# Altium footprint library WR-TBL_Pluggable Connector_3.81mm.PcbLib: 201 footprints (part 5 of 13)
Each footprint in its own frame and in the unit in brackets; x right, y up, seen from the top. Pads: shape width x height; smd on the part's side, far side on the other; paste and mask are expansions set on the pad; w line width, h text height; cw(c..) or ccw(c..) is an arc to the next point about the centre after c.
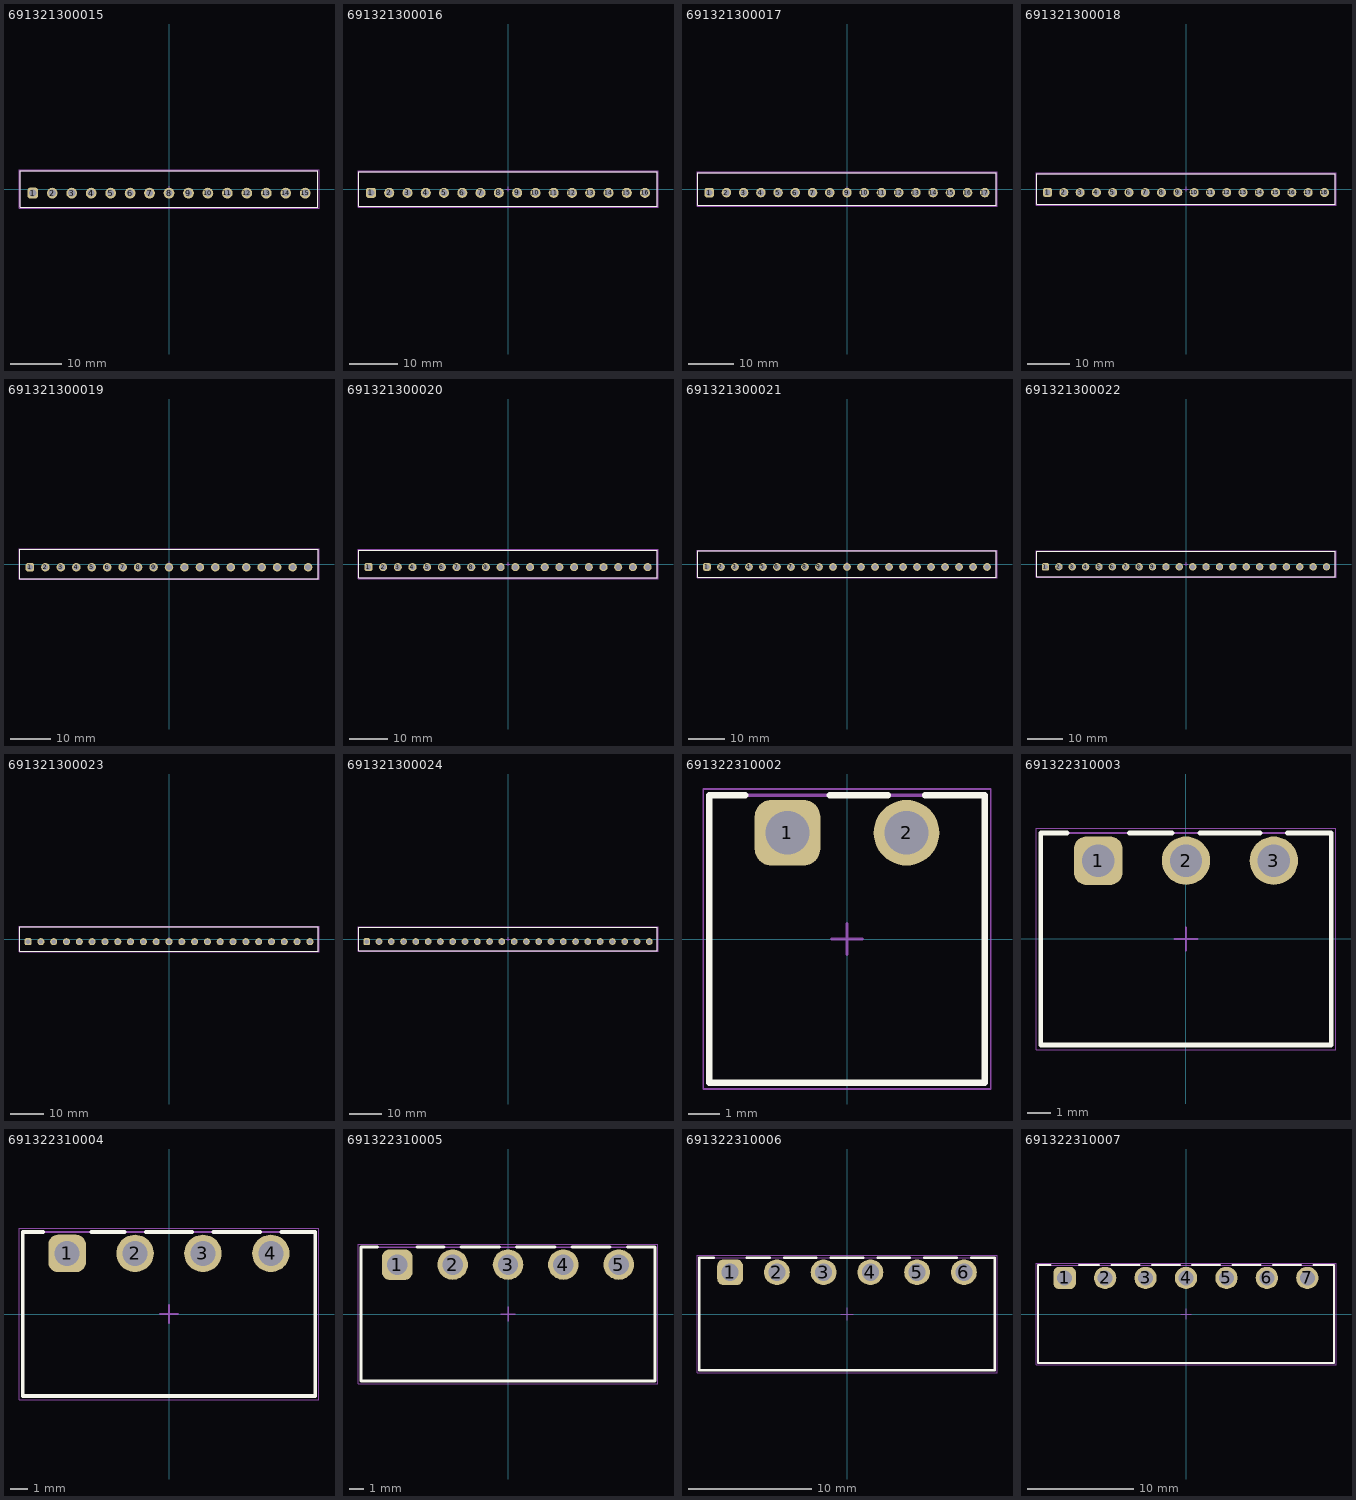
[diagram p4: the footprints below, top view; thin cyan lines are the x and y axes]

## 691321300015 [mm] "Vertical PCB Header, pitch 3.81mm, 15p"
height 9.2
pads (15):
  rrect50% 2.1x2.1 hole 1.4: 1(-26.67,-0.8)
  round 2.1 hole 1.4: 2(-22.86,-0.8) 3(-19.05,-0.8) 4(-15.24,-0.8) 5(-11.43,-0.8) 6(-7.62,-0.8) 7(-3.81,-0.8) 8(0,-0.8) 9(3.81,-0.8) 10(7.62,-0.8) 11(11.43,-0.8) 12(15.24,-0.8) 13(19.05,-0.8) 14(22.86,-0.8) 15(26.67,-0.8)
Top Overlay:
  lines w0.2: -29.17,-3.6 29.17,-3.6 29.17,3.6 -29.17,3.6 -29.17,-3.6
Top Assembly:
  lines w0.1: -29.17,-3.6 -29.17,3.6 29.17,3.6 29.17,-3.6 -29.17,-3.6
Top Designator:
  text ".Designator" at -3.647,-0.357 h1
Top 3D Body:
  lines w0.1: -29.17,-3.6 29.17,-3.6 29.17,3.6 -29.17,3.6 -29.17,-3.6
Top Courtyard:
  lines w0.05: -29.37,-3.8 -29.37,3.8 29.37,3.8 29.37,-3.8 -29.37,-3.8
Top Component Center:
  lines w0.1: -0.5,0 0.5,0 ; 0,-0.5 0,0.5
3D body "691321300015.stp": height 9.25, standoff -3.45, extent -29.17,-3.6 29.17,3.6

## 691321300016 [mm] "Vertical PCB Header, pitch 3.81mm, 16p"
height 9.2
pads (16):
  rrect50% 2.1x2.1 hole 1.4: 1(-28.575,-0.8)
  round 2.1 hole 1.4: 2(-24.765,-0.8) 3(-20.955,-0.8) 4(-17.145,-0.8) 5(-13.335,-0.8) 6(-9.525,-0.8) 7(-5.715,-0.8) 8(-1.905,-0.8) 9(1.905,-0.8) 10(5.715,-0.8) 11(9.525,-0.8) 12(13.335,-0.8) 13(17.145,-0.8) 14(20.955,-0.8) 15(24.765,-0.8) 16(28.575,-0.8)
Top Overlay:
  lines w0.2: -31.075,-3.6 31.075,-3.6 31.075,3.6 -31.075,3.6 -31.075,-3.6
Top Assembly:
  lines w0.1: -31.075,-3.6 -31.075,3.6 31.075,3.6 31.075,-3.6 -31.075,-3.6
Top Designator:
  text ".Designator" at -3.647,-0.357 h1
Top 3D Body:
  lines w0.1: -31.075,-3.6 31.075,-3.6 31.075,3.6 -31.075,3.6 -31.075,-3.6
Top Courtyard:
  lines w0.05: -31.275,-3.8 -31.275,3.8 31.275,3.8 31.275,-3.8 -31.275,-3.8
Top Component Center:
  lines w0.1: -0.5,0 0.5,0 ; 0,-0.5 0,0.5
3D body "691321300016.stp": height 9.25, standoff -3.45, extent -31.075,-3.6 31.075,3.6

## 691321300017 [mm] "Vertical PCB Header, pitch 3.81mm, 17p"
height 9.2
pads (17):
  rrect50% 2.1x2.1 hole 1.4: 1(-30.48,-0.8)
  round 2.1 hole 1.4: 2(-26.67,-0.8) 3(-22.86,-0.8) 4(-19.05,-0.8) 5(-15.24,-0.8) 6(-11.43,-0.8) 7(-7.62,-0.8) 8(-3.81,-0.8) 9(0,-0.8) 10(3.81,-0.8) 11(7.62,-0.8) 12(11.43,-0.8) 13(15.24,-0.8) 14(19.05,-0.8) 15(22.86,-0.8) 16(26.67,-0.8) 17(30.48,-0.8)
Top Overlay:
  lines w0.2: -32.98,-3.6 -32.98,3.6 32.98,3.6 32.98,-3.6 -32.98,-3.6
Top Assembly:
  lines w0.1: -32.98,-3.6 32.98,-3.6 32.98,3.6 -32.98,3.6 -32.98,-3.6
Top Designator:
  text ".Designator" at -3.647,-0.357 h1
Top 3D Body:
  lines w0.1: -32.98,-3.6 -32.98,3.6 32.98,3.6 32.98,-3.6 -32.98,-3.6
Top Courtyard:
  lines w0.05: -33.18,-3.8 33.18,-3.8 33.18,3.8 -33.18,3.8 -33.18,-3.8
Top Component Center:
  lines w0.1: -0.5,0 0.5,0 ; 0,-0.5 0,0.5
3D body "691321300017.stp": height 9.25, standoff -3.45, extent -32.98,-3.6 32.98,3.6

## 691321300018 [mm] "Vertical PCB Header, pitch 3.81mm, 18p"
height 9.2
pads (18):
  rrect50% 2.1x2.1 hole 1.4: 1(-32.385,-0.8)
  round 2.1 hole 1.4: 2(-28.575,-0.8) 3(-24.765,-0.8) 4(-20.955,-0.8) 5(-17.145,-0.8) 6(-13.335,-0.8) 7(-9.525,-0.8) 8(-5.715,-0.8) 9(-1.905,-0.8) 10(1.905,-0.8) 11(5.715,-0.8) 12(9.525,-0.8) 13(13.335,-0.8) 14(17.145,-0.8) 15(20.955,-0.8) 16(24.765,-0.8) 17(28.575,-0.8) 18(32.385,-0.8)
Top Overlay:
  lines w0.2: -34.885,-3.6 34.885,-3.6 34.885,3.6 -34.885,3.6 -34.885,-3.6
Top Assembly:
  lines w0.1: -34.885,-3.6 -34.885,3.6 34.885,3.6 34.885,-3.6 -34.885,-3.6
Top Designator:
  text ".Designator" at -3.647,-0.357 h1
Top 3D Body:
  lines w0.1: -34.885,-3.6 34.885,-3.6 34.885,3.6 -34.885,3.6 -34.885,-3.6
Top Courtyard:
  lines w0.05: -35.085,-3.8 -35.085,3.8 35.085,3.8 35.085,-3.8 -35.085,-3.8
Top Component Center:
  lines w0.1: -0.5,0 0.5,0 ; 0,-0.5 0,0.5
3D body "691321300018.stp": height 9.25, standoff -3.45, extent -34.885,-3.6 34.885,3.6

## 691321300019 [mm] "Vertical PCB Header, pitch 3.81mm, 19p"
height 9.2
pads (19):
  rrect50% 2.1x2.1 hole 1.4: 1(-34.29,-0.8)
  round 2.1 hole 1.4: 2(-30.48,-0.8) 3(-26.67,-0.8) 4(-22.86,-0.8) 5(-19.05,-0.8) 6(-15.24,-0.8) 7(-11.43,-0.8) 8(-7.62,-0.8) 9(-3.81,-0.8) 10(0,-0.8) 11(3.81,-0.8) 12(7.62,-0.8) 13(11.43,-0.8) 14(15.24,-0.8) 15(19.05,-0.8) 16(22.86,-0.8) 17(26.67,-0.8) 18(30.48,-0.8) 19(34.29,-0.8)
Top Overlay:
  lines w0.2: -36.79,-3.6 36.79,-3.6 36.79,3.6 -36.79,3.6 -36.79,-3.6
Top Assembly:
  lines w0.1: -36.79,-3.6 -36.79,3.6 36.79,3.6 36.79,-3.6 -36.79,-3.6
Top Designator:
  text ".Designator" at -3.647,-0.357 h1
Top 3D Body:
  lines w0.1: -36.79,-3.6 36.79,-3.6 36.79,3.6 -36.79,3.6 -36.79,-3.6
Top Courtyard:
  lines w0.05: -36.99,-3.8 -36.99,3.8 36.99,3.8 36.99,-3.8 -36.99,-3.8
Top Component Center:
  lines w0.1: -0.5,0 0.5,0 ; 0,-0.5 0,0.5
3D body "691321300019.stp": height 9.25, standoff -3.45, extent -36.79,-3.6 36.79,3.6

## 691321300020 [mm] "Vertical PCB Header, pitch 3.81mm, 20p"
height 9.2
pads (20):
  rrect50% 2.1x2.1 hole 1.4: 1(-36.195,-0.8)
  round 2.1 hole 1.4: 2(-32.385,-0.8) 3(-28.575,-0.8) 4(-24.765,-0.8) 5(-20.955,-0.8) 6(-17.145,-0.8) 7(-13.335,-0.8) 8(-9.525,-0.8) 9(-5.715,-0.8) 10(-1.905,-0.8) 11(1.905,-0.8) 12(5.715,-0.8) 13(9.525,-0.8) 14(13.335,-0.8) 15(17.145,-0.8) 16(20.955,-0.8) 17(24.765,-0.8) 18(28.575,-0.8) 19(32.385,-0.8) 20(36.195,-0.8)
Top Overlay:
  lines w0.2: -38.695,-3.6 38.695,-3.6 38.695,3.6 -38.695,3.6 -38.695,-3.6
Top Assembly:
  lines w0.1: -38.695,-3.6 -38.695,3.6 38.695,3.6 38.695,-3.6 -38.695,-3.6
Top Designator:
  text ".Designator" at -3.647,-0.357 h1
Top 3D Body:
  lines w0.1: -38.695,-3.6 38.695,-3.6 38.695,3.6 -38.695,3.6 -38.695,-3.6
Top Courtyard:
  lines w0.05: -38.895,-3.8 -38.895,3.8 38.895,3.8 38.895,-3.8 -38.895,-3.8
Top Component Center:
  lines w0.1: -0.5,0 0.5,0 ; 0,-0.5 0,0.5
3D body "691321300020.stp": height 9.25, standoff -3.45, extent -38.695,-3.6 38.695,3.6

## 691321300021 [mm] "Vertical PCB Header, pitch 3.81mm, 21p"
height 9.2
pads (21):
  rrect50% 2.1x2.1 hole 1.4: 1(-38.1,-0.8)
  round 2.1 hole 1.4: 2(-34.29,-0.8) 3(-30.48,-0.8) 4(-26.67,-0.8) 5(-22.86,-0.8) 6(-19.05,-0.8) 7(-15.24,-0.8) 8(-11.43,-0.8) 9(-7.62,-0.8) 10(-3.81,-0.8) 11(0,-0.8) 12(3.81,-0.8) 13(7.62,-0.8) 14(11.43,-0.8) 15(15.24,-0.8) 16(19.05,-0.8) 17(22.86,-0.8) 18(26.67,-0.8) 19(30.48,-0.8) 20(34.29,-0.8) 21(38.1,-0.8)
Top Overlay:
  lines w0.2: -40.6,-3.6 40.6,-3.6 40.6,3.6 -40.6,3.6 -40.6,-3.6
Top Assembly:
  lines w0.1: -40.6,-3.6 -40.6,3.6 40.6,3.6 40.6,-3.6 -40.6,-3.6
Top Designator:
  text ".Designator" at -3.647,-0.357 h1
Top 3D Body:
  lines w0.1: -40.6,-3.6 40.6,-3.6 40.6,3.6 -40.6,3.6 -40.6,-3.6
Top Courtyard:
  lines w0.05: -40.8,-3.8 -40.8,3.8 40.8,3.8 40.8,-3.8 -40.8,-3.8
Top Component Center:
  lines w0.1: -0.5,0 0.5,0 ; 0,-0.5 0,0.5
3D body "691321300021.stp": height 9.25, standoff -3.45, extent -40.6,-3.6 40.6,3.6

## 691321300022 [mm] "Vertical PCB Header, pitch 3.81mm, 22p"
height 9.2
pads (22):
  rrect50% 2.1x2.1 hole 1.4: 1(-40.005,-0.8)
  round 2.1 hole 1.4: 2(-36.195,-0.8) 3(-32.385,-0.8) 4(-28.575,-0.8) 5(-24.765,-0.8) 6(-20.955,-0.8) 7(-17.145,-0.8) 8(-13.335,-0.8) 9(-9.525,-0.8) 10(-5.715,-0.8) 11(-1.905,-0.8) 12(1.905,-0.8) 13(5.715,-0.8) 14(9.525,-0.8) 15(13.335,-0.8) 16(17.145,-0.8) 17(20.955,-0.8) 18(24.765,-0.8) 19(28.575,-0.8) 20(32.385,-0.8) 21(36.195,-0.8) 22(40.005,-0.8)
Top Overlay:
  lines w0.2: -42.505,-3.6 -42.505,3.6 42.505,3.6 42.505,-3.6 -42.505,-3.6
Top Assembly:
  lines w0.1: -42.505,-3.6 42.505,-3.6 42.505,3.6 -42.505,3.6 -42.505,-3.6
Top Designator:
  text ".Designator" at -3.647,-0.357 h1
Top 3D Body:
  lines w0.1: -42.505,-3.6 -42.505,3.6 42.505,3.6 42.505,-3.6 -42.505,-3.6
Top Courtyard:
  lines w0.05: -42.705,-3.8 42.705,-3.8 42.705,3.8 -42.705,3.8 -42.705,-3.8
Top Component Center:
  lines w0.1: -0.5,0 0.5,0 ; 0,-0.5 0,0.5
3D body "691321300022.stp": height 9.25, standoff -3.45, extent -42.505,-3.6 42.505,3.6

## 691321300023 [mm] "Vertical PCB Header, pitch 3.81mm, 23p"
height 9.2
pads (23):
  rrect50% 2.1x2.1 hole 1.4: 1(-41.91,-0.8)
  round 2.1 hole 1.4: 2(-38.1,-0.8) 3(-34.29,-0.8) 4(-30.48,-0.8) 5(-26.67,-0.8) 6(-22.86,-0.8) 7(-19.05,-0.8) 8(-15.24,-0.8) 9(-11.43,-0.8) 10(-7.62,-0.8) 11(-3.81,-0.8) 12(0,-0.8) 13(3.81,-0.8) 14(7.62,-0.8) 15(11.43,-0.8) 16(15.24,-0.8) 17(19.05,-0.8) 18(22.86,-0.8) 19(26.67,-0.8) 20(30.48,-0.8) 21(34.29,-0.8) 22(38.1,-0.8) 23(41.91,-0.8)
Top Overlay:
  lines w0.2: -44.41,-3.6 -44.41,3.6 44.41,3.6 44.41,-3.6 -44.41,-3.6
Top Assembly:
  lines w0.1: -44.41,-3.6 44.41,-3.6 44.41,3.6 -44.41,3.6 -44.41,-3.6
Top Designator:
  text ".Designator" at -3.647,-0.357 h1
Top 3D Body:
  lines w0.1: -44.41,-3.6 -44.41,3.6 44.41,3.6 44.41,-3.6 -44.41,-3.6
Top Courtyard:
  lines w0.05: -44.61,-3.8 44.61,-3.8 44.61,3.8 -44.61,3.8 -44.61,-3.8
Top Component Center:
  lines w0.1: -0.5,0 0.5,0 ; 0,-0.5 0,0.5
3D body "691321300023.stp": height 9.25, standoff -3.45, extent -44.41,-3.6 44.41,3.6

## 691321300024 [mm] "Vertical PCB Header, pitch 3.81mm, 24p"
height 9.2
pads (24):
  rrect50% 2.1x2.1 hole 1.4: 1(-43.815,-0.8)
  round 2.1 hole 1.4: 2(-40.005,-0.8) 3(-36.195,-0.8) 4(-32.385,-0.8) 5(-28.575,-0.8) 6(-24.765,-0.8) 7(-20.955,-0.8) 8(-17.145,-0.8) 9(-13.335,-0.8) 10(-9.525,-0.8) 11(-5.715,-0.8) 12(-1.905,-0.8) 13(1.905,-0.8) 14(5.715,-0.8) 15(9.525,-0.8) 16(13.335,-0.8) 17(17.145,-0.8) 18(20.955,-0.8) 19(24.765,-0.8) 20(28.575,-0.8) 21(32.385,-0.8) 22(36.195,-0.8) 23(40.005,-0.8) 24(43.815,-0.8)
Top Overlay:
  lines w0.2: -46.315,-3.6 -46.315,3.6 46.315,3.6 46.315,-3.6 -46.315,-3.6
Top Assembly:
  lines w0.1: -46.315,-3.6 46.315,-3.6 46.315,3.6 -46.315,3.6 -46.315,-3.6
Top Designator:
  text ".Designator" at -3.647,-0.357 h1
Top 3D Body:
  lines w0.1: -46.315,-3.6 -46.315,3.6 46.315,3.6 46.315,-3.6 -46.315,-3.6
Top Courtyard:
  lines w0.05: -46.515,-3.8 46.515,-3.8 46.515,3.8 -46.515,3.8 -46.515,-3.8
Top Component Center:
  lines w0.1: -0.5,0 0.5,0 ; 0,-0.5 0,0.5
3D body "691321300024.stp": height 9.25, standoff -3.45, extent -46.315,-3.6 46.315,3.6

## 691322310002 [mm] "Horizontal PCB Header, pitch 3.81mm, 02p"
height 7
pads (2):
  rrect50% 2.1x2.1 hole 1.4: 1(-1.905,3.4)
  round 2.1 hole 1.4: 2(1.905,3.4)
Top Overlay:
  lines w0.2: -3.255,4.6 -4.405,4.6 -4.405,-4.6 4.405,-4.6 4.405,4.6 2.495,4.6 ; -0.555,4.6 1.315,4.6
Top Assembly:
  lines w0.1: -4.405,-4.6 -4.405,4.6 4.405,4.6 4.405,-4.6 -4.405,-4.6
Top Designator:
  text ".Designator" at -3.647,-0.357 h1
Top 3D Body:
  lines w0.1: -4.405,-4.6 4.405,-4.6 4.405,4.6 -4.405,4.6 -4.405,-4.6
Top Courtyard:
  lines w0.05: -4.605,-4.8 -4.605,4.8 4.605,4.8 4.605,-4.8 -4.605,-4.8
Top Component Center:
  lines w0.1: -0.5,0 0.5,0 ; 0,-0.5 0,0.5
3D body "691322310002.stp": height 7.25, standoff -3.45, extent -4.405,-4.6 4.405,4.6

## 691322310003 [mm] "Horizontal PCB Header, pitch 3.81mm, 03p"
height 7
pads (3):
  rrect50% 2.1x2.1 hole 1.4: 1(-3.81,3.4)
  round 2.1 hole 1.4: 2(0,3.4) 3(3.81,3.4)
Top Overlay:
  lines w0.2: -5.16,4.6 -6.31,4.6 -6.31,-4.6 6.31,-4.6 6.31,4.6 4.4,4.6 ; -2.46,4.6 -0.59,4.6 ; 0.59,4.6 3.22,4.6
Top Assembly:
  lines w0.1: -6.31,-4.6 6.31,-4.6 6.31,4.6 -6.31,4.6 -6.31,-4.6
Top Designator:
  text ".Designator" at -3.647,-0.357 h1
Top 3D Body:
  lines w0.1: -6.31,-4.6 -6.31,4.6 6.31,4.6 6.31,-4.6 -6.31,-4.6
Top Courtyard:
  lines w0.05: -6.51,-4.8 6.51,-4.8 6.51,4.8 -6.51,4.8 -6.51,-4.8
Top Component Center:
  lines w0.1: -0.5,0 0.5,0 ; 0,-0.5 0,0.5
3D body "691322310003.stp": height 7.25, standoff -3.45, extent -6.31,-4.6 6.31,4.6

## 691322310004 [mm] "Horizontal PCB Header, pitch 3.81mm, 04p"
height 7
pads (4):
  rrect50% 2.1x2.1 hole 1.4: 1(-5.715,3.4)
  round 2.1 hole 1.4: 2(-1.905,3.4) 3(1.905,3.4) 4(5.715,3.4)
Top Overlay:
  lines w0.2: -7.065,4.6 -8.215,4.6 -8.215,-4.6 8.215,-4.6 8.215,4.6 6.305,4.6 ; -4.365,4.6 -2.495,4.6 ; -1.315,4.6 1.315,4.6 ; 2.495,4.6 5.125,4.6
Top Assembly:
  lines w0.1: -8.215,-4.6 8.215,-4.6 8.215,4.6 -8.215,4.6 -8.215,-4.6
Top Designator:
  text ".Designator" at -3.647,-0.357 h1
Top 3D Body:
  lines w0.1: -8.215,-4.6 -8.215,4.6 8.215,4.6 8.215,-4.6 -8.215,-4.6
Top Courtyard:
  lines w0.05: -8.415,-4.8 8.415,-4.8 8.415,4.8 -8.415,4.8 -8.415,-4.8
Top Component Center:
  lines w0.1: -0.5,0 0.5,0 ; 0,-0.5 0,0.5
3D body "691322310004.stp": height 7.25, standoff -3.45, extent -8.215,-4.6 8.215,4.6

## 691322310005 [mm] "Horizontal PCB Header, pitch 3.81mm, 05p"
height 7
pads (5):
  rrect50% 2.1x2.1 hole 1.4: 1(-7.62,3.4)
  round 2.1 hole 1.4: 2(-3.81,3.4) 3(0,3.4) 4(3.81,3.4) 5(7.62,3.4)
Top Overlay:
  lines w0.2: -8.97,4.6 -10.12,4.6 -10.12,-4.6 10.12,-4.6 10.12,4.6 8.21,4.6 ; -6.27,4.6 -4.4,4.6 ; -3.22,4.6 -0.59,4.6 ; 0.59,4.6 3.22,4.6 ; 4.4,4.6 7.03,4.6
Top Assembly:
  lines w0.1: -10.12,-4.6 -10.12,4.6 10.12,4.6 10.12,-4.6 -10.12,-4.6
Top Designator:
  text ".Designator" at -3.647,-0.357 h1
Top 3D Body:
  lines w0.1: -10.12,-4.6 10.12,-4.6 10.12,4.6 -10.12,4.6 -10.12,-4.6
Top Courtyard:
  lines w0.05: -10.32,-4.8 -10.32,4.8 10.32,4.8 10.32,-4.8 -10.32,-4.8
Top Component Center:
  lines w0.1: -0.5,0 0.5,0 ; 0,-0.5 0,0.5
3D body "691322310005.stp": height 7.25, standoff -3.45, extent -10.12,-4.6 10.12,4.6

## 691322310006 [mm] "Horizontal PCB Header, pitch 3.81mm, 06p"
height 7
pads (6):
  rrect50% 2.1x2.1 hole 1.4: 1(-9.525,3.4)
  round 2.1 hole 1.4: 2(-5.715,3.4) 3(-1.905,3.4) 4(1.905,3.4) 5(5.715,3.4) 6(9.525,3.4)
Top Overlay:
  lines w0.2: -10.875,4.6 -12.025,4.6 -12.025,-4.6 12.025,-4.6 12.025,4.6 10.115,4.6 ; -8.175,4.6 -6.305,4.6 ; -5.125,4.6 -2.495,4.6 ; -1.315,4.6 1.315,4.6 ; 2.495,4.6 5.125,4.6 ; 6.305,4.6 8.935,4.6
Top Assembly:
  lines w0.1: -12.025,-4.6 -12.025,4.6 12.025,4.6 12.025,-4.6 -12.025,-4.6
Top Designator:
  text ".Designator" at -3.647,-0.357 h1
Top 3D Body:
  lines w0.1: -12.025,-4.6 12.025,-4.6 12.025,4.6 -12.025,4.6 -12.025,-4.6
Top Courtyard:
  lines w0.05: -12.225,-4.8 -12.225,4.8 12.225,4.8 12.225,-4.8 -12.225,-4.8
Top Component Center:
  lines w0.1: -0.5,0 0.5,0 ; 0,-0.5 0,0.5
3D body "691322310006.stp": height 7.25, standoff -3.45, extent -12.025,-4.6 12.025,4.6

## 691322310007 [mm] "Horizontal PCB Header, pitch 3.81mm, 07p"
height 7
pads (7):
  rrect50% 2.1x2.1 hole 1.4: 1(-11.43,3.4)
  round 2.1 hole 1.4: 2(-7.62,3.4) 3(-3.81,3.4) 4(0,3.4) 5(3.81,3.4) 6(7.62,3.4) 7(11.43,3.4)
Top Overlay:
  lines w0.2: -12.78,4.6 -13.93,4.6 -13.93,-4.6 13.93,-4.6 13.93,4.6 12.02,4.6 ; -10.08,4.6 -8.21,4.6 ; -7.03,4.6 -4.4,4.6 ; -3.22,4.6 -0.59,4.6 ; 0.59,4.6 3.22,4.6 ; 4.4,4.6 7.03,4.6 ; 8.21,4.6 10.84,4.6
Top Assembly:
  lines w0.1: -13.93,-4.6 13.93,-4.6 13.93,4.6 -13.93,4.6 -13.93,-4.6
Top Designator:
  text ".Designator" at -3.647,-0.357 h1
Top 3D Body:
  lines w0.1: -13.93,-4.6 -13.93,4.6 13.93,4.6 13.93,-4.6 -13.93,-4.6
Top Courtyard:
  lines w0.05: -14.13,-4.8 14.13,-4.8 14.13,4.8 -14.13,4.8 -14.13,-4.8
Top Component Center:
  lines w0.1: -0.5,0 0.5,0 ; 0,-0.5 0,0.5
3D body "691322310007.stp": height 7.25, standoff -3.45, extent -13.93,-4.6 13.93,4.6